# Altium integrated library SN74LVC244ADWR.IntLib: 1 symbol
Pins are listed as number, name and electrical type; pins without a type are passive.

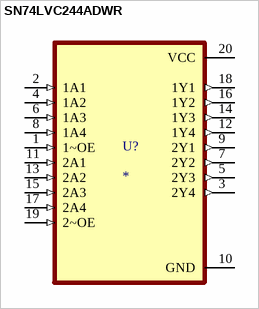
[diagram p0: symbol SN74LVC244ADWR]

## SN74LVC244ADWR
designator U?
8-ch, 1.65-V to 3.6-V buffers with 3-state outputs; MF: Texas Instruments; MP: SN74LVC244ADWR; SnapEDA_Link: https://www.snapeda.com/parts/SN74LVC244ADWR/Texas+Instruments/view-part/?ref=snap; Package: SOIC-20 Texas Instruments; Value: *; Check_prices: https://www.snapeda.com/parts/SN74LVC244ADWR/Texas+Instruments/view-part/?ref=eda
footprint SOIC127P1030X265-20N
pins: 1 1~OE (in), 2 1A1 (in), 3 2Y4 (out), 4 1A2 (in), 5 2Y3 (out), 6 1A3 (in), 7 2Y2 (out), 8 1A4 (in), 9 2Y1 (out), 10 GND (power), 11 2A1 (in), 12 1Y4 (out), 13 2A2 (in), 14 1Y3 (out), 15 2A3 (in), 16 1Y2 (out), 17 2A4 (in), 18 1Y1 (out), 19 2~OE (in), 20 VCC (power)